# Altium footprint library S_S.PcbLib: 51 footprints (part 2 of 4)
Each footprint in its own frame and in the unit in brackets; x right, y up, seen from the top. Pads: shape width x height; smd on the part's side, far side on the other; paste and mask are expansions set on the pad; w line width, h text height; cw(c..) or ccw(c..) is an arc to the next point about the centre after c.
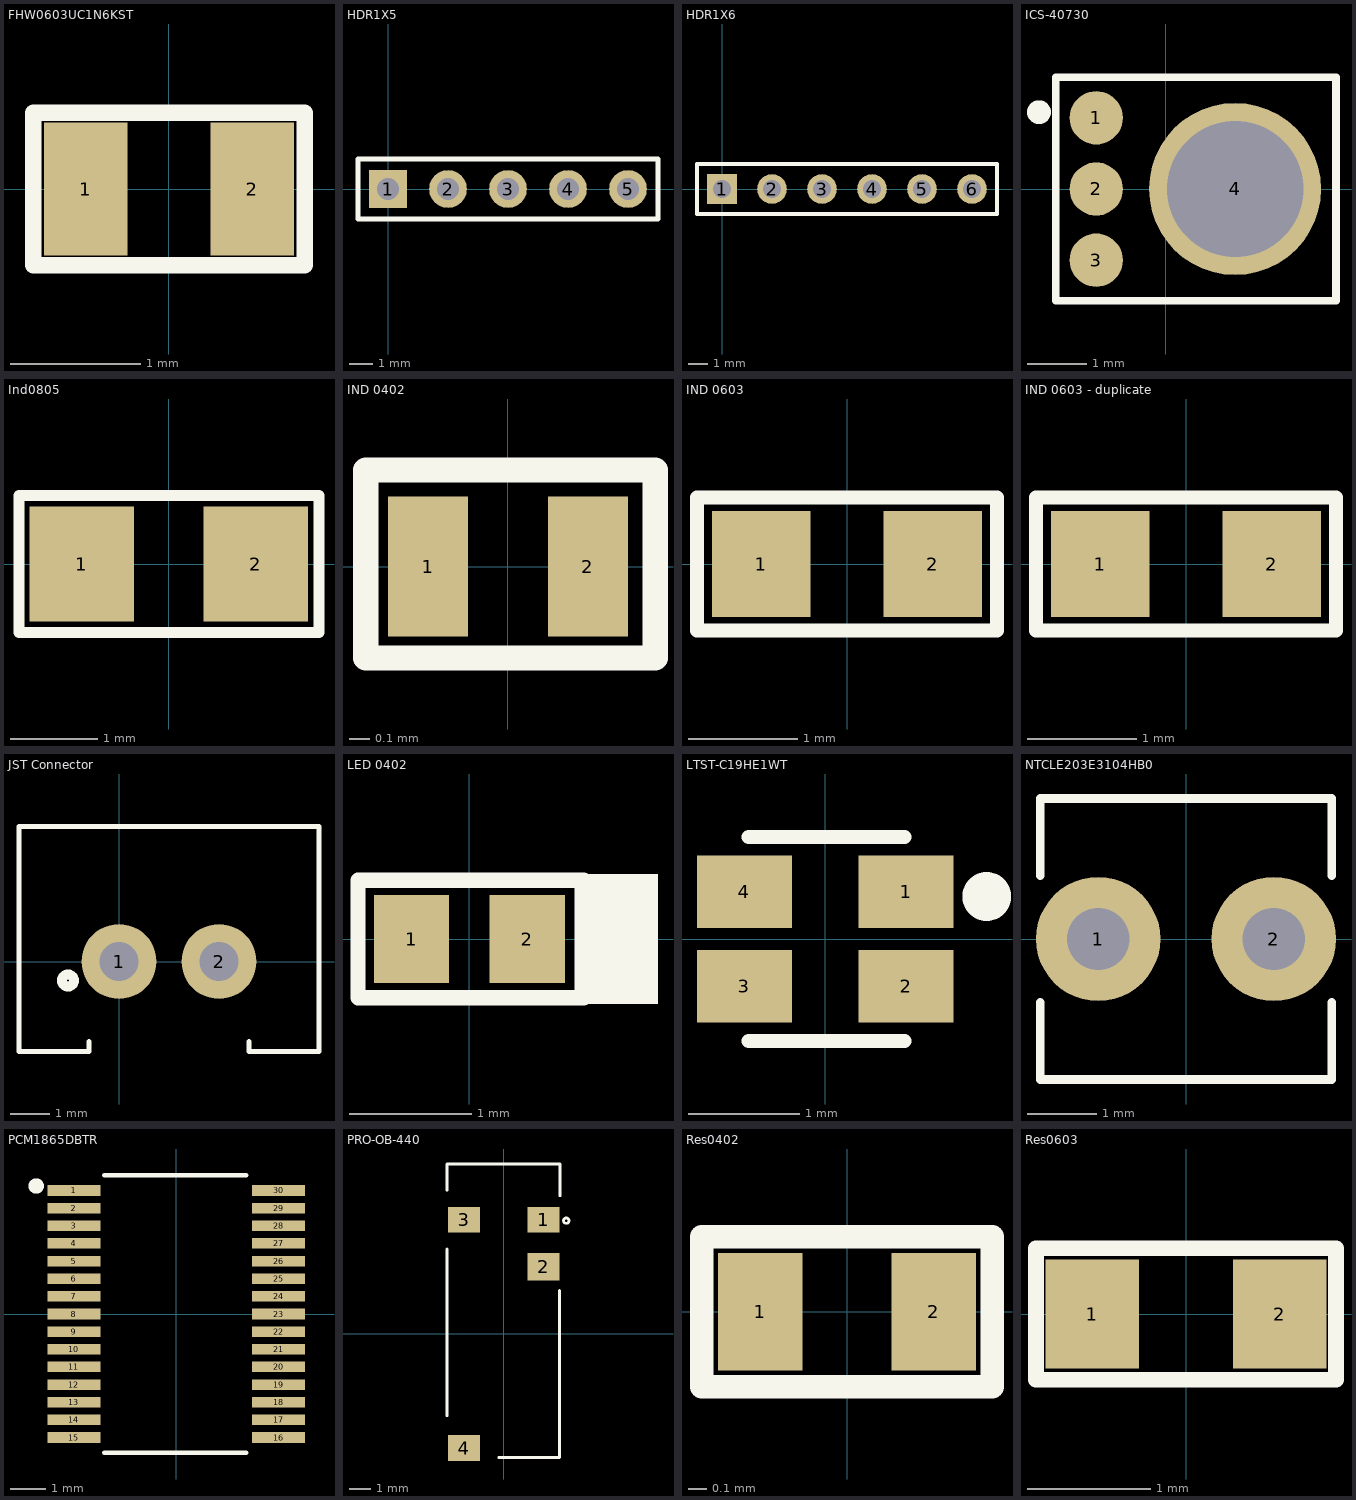
[diagram p1: the footprints below, top view; thin cyan lines are the x and y axes]

## FHW0603UC1N6KST [mm] "700mA 1.6nH ±10% 40mO 0603"
pads (2):
  rect 0.64x1.02 smd: 1(-0.64,0) 2(0.64,0)
Top Overlay:
  lines w0.127: -1.041,-0.584 -1.041,0.584 1.041,0.584 1.041,-0.584 -1.041,-0.584
3D body "Coilcraft-0603DC.STEP": height -0.37, standoff -1.23, extent -0.81,-0.365 0.81,0.365

## HDR1X5 [mm] "Connector; Header; 5 Position"
pads (5):
  rect 1.6x1.6 hole 0.95: 1(0,0)
  round 1.6 hole 0.95: 2(2.54,0) 3(5.08,0) 4(7.62,0) 5(10.16,0)
Top Overlay:
  lines w0.2: -1.27,-1.27 11.43,-1.27 11.43,1.27 -1.27,1.27 -1.27,-1.27
3D body "CircuitWorks-HEADER 2_54 VERTICAL 5X.step": height 8.65, standoff -2.35, extent -1.27,-1.27 11.43,1.23

## HDR1X6 [mm] "Connector; Header; 6 Position"
pads (6):
  rect 1.5x1.5 hole 0.9: 1(0,0)
  round 1.5 hole 0.9: 2(2.54,0) 3(5.08,0) 4(7.62,0) 5(10.16,0) 6(12.7,0)
Top Overlay:
  lines w0.2: -1.27,-1.27 13.97,-1.27 13.97,1.27 -1.27,1.27 -1.27,-1.27
3D body "User Library-Header_Male_6Pin.STEP": height 8.54, standoff -3, extent -1.27,-1.245 13.97,1.245

## ICS-40730 [mm]
pads (4):
  round 0.9 smd: 1(-1.17,1.2) 2(-1.17,0) 3(-1.17,-1.2)
  round 2.9 hole 2.3: 4(1.17,0)
Top Overlay:
  circle w0.3: c-2.135,1.295 r0.05
  lines w0.127: -1.85,-1.88 -1.85,1.88 2.87,1.88 2.87,-1.88 -1.85,-1.88
3D body "MK.STEP": height 3.55, standoff 0.03, extent -1.852,-1.88 2.868,1.88

## Ind0805 [mm] "Inductor 0805"
pads (2):
  rect 1.2x1.32 smd: 1(-1,0) 2(1,0)
Top Overlay:
  lines w0.127: -1.723,-0.787 -1.723,0.787 1.727,0.787 1.727,-0.787 -1.723,-0.787
3D body "45637.stp": height 0.47, standoff -0.03, extent -1,-0.625 1,0.625

## IND 0402 [mm]
pads (2):
  rect 0.4x0.7 smd: 1(-0.4,0) 2(0.4,0)
Top Overlay:
  lines w0.127: -0.711,-0.457 0.737,-0.457 0.737,0.483 -0.711,0.483 -0.711,-0.457
3D body "User Library-Chip Inductor.step": height 0.49, standoff -0.01, extent -0.5,-0.295 0.5,0.305

## IND 0603 [mm]
pads (2):
  rect 0.9x0.97 smd: 1(-0.785,0) 2(0.785,0)
Top Overlay:
  lines w0.127: -1.372,-0.61 1.372,-0.61 1.372,0.61 -1.372,0.61 -1.372,-0.61
3D body "45630.stp": height 0.76, standoff -0.04, extent -0.8,-0.4 0.8,0.4

## IND 0603 - duplicate [mm]
pads (2):
  rect 0.9x0.97 smd: 1(-0.785,0) 2(0.785,0)
Top Overlay:
  lines w0.127: -1.372,-0.61 1.372,-0.61 1.372,0.61 -1.372,0.61 -1.372,-0.61
3D body "45630.stp": height 0.76, standoff -0.04, extent -0.8,-0.4 0.8,0.4

## JST Connector [mil] "2 Pin JST Connector"
pads (2):
  round 75 hole 39: 1(0,0) 2(100,0)
Top Overlay:
  circle w10: c-51,-19 r6
  lines w5: -30,-80 -30,-90 -100,-90 -100,135 200,135 200,-90 130,-90 130,-80
3D body "User Library-PW10-XX-M blue.step": height 283.59, standoff -121.92, extent -97.64,-89.41 197.64,135

## LED 0402 [mm]
pads (2):
  rect 0.62x0.72 smd: 1(-0.475,0) 2(0.475,0)
Top Overlay:
  rectangle: 0.864,-0.533 1.549,0.533
  lines w0.127: 0.94,-0.483 -0.914,-0.483 -0.914,0.483 0.94,0.483
3D body "User Library-LED-0402.step": height 0.45, standoff 0, extent -0.505,-0.25 0.505,0.25

## LTST-C19HE1WT [mm]
pads (4):
  rect 0.85x0.65 smd: 1(0.725,0.425) 2(0.725,-0.425) 3(-0.725,-0.425) 4(-0.725,0.425)
Top Overlay:
  circle w0.254: c1.448,0.381 r0.092
  lines w0.127: -0.686,-0.914 0.711,-0.914 ; -0.686,0.914 0.711,0.914
3D body "LTST-C19HE1WT--3DModel-STEP-56544.STEP": height 0.35, standoff 0, extent -0.8,-0.8 0.8,0.8

## NTCLE203E3104HB0 [mm]
pads (2):
  round 1.8 hole 0.9: 1(-1.27,0) 2(1.27,0)
Top Overlay:
  lines w0.127: -2.108,-0.914 -2.108,-2.032 2.108,-2.032 2.108,-0.914 ; -2.108,0.914 -2.108,2.032 2.108,2.032 2.108,0.914
3D body "NTCLE203E3202SB0.STEP": height 8.5, standoff -38.5, extent -2.099,-2 2.082,2

## PCM1865DBTR [mm]
pads (30):
  rect 1.5x0.3 smd: 1(-2.9,3.5) 2(-2.9,3) 3(-2.9,2.5) 4(-2.9,2) 5(-2.9,1.5) 6(-2.9,1) 7(-2.9,0.5) 8(-2.9,0) 9(-2.9,-0.5) 10(-2.9,-1) 11(-2.9,-1.5) 12(-2.9,-2) 13(-2.9,-2.5) 14(-2.9,-3) 15(-2.9,-3.5) 16(2.9,-3.5) 17(2.9,-3) 18(2.9,-2.5) 19(2.9,-2) 20(2.9,-1.5) 21(2.9,-1) 22(2.9,-0.5) 23(2.9,0) 24(2.9,0.5) 25(2.9,1) 26(2.9,1.5) 27(2.9,2) 28(2.9,2.5) 29(2.9,3) 30(2.9,3.5)
Top Overlay:
  circle w0.254: c-3.967,3.627 r0.092
  lines w0.127: -2.032,-3.937 1.981,-3.937 ; -2.032,3.937 1.981,3.937
3D body "DBT0030A.stp": height 1.13, standoff 0, extent -3.2,-3.9 3.2,3.9

## PRO-OB-440 [mm] "RF ANT 2.4GHZ STAMPED MET SLD"
pads (4):
  rect 1.5x1.2 smd: 1(1.865,5.35) 3(-1.865,5.35) 4(-1.865,-5.35)
  rect 1.5x1.28 smd: 2(1.865,3.15)
Top Overlay:
  circle w0.127: c2.921,5.309 r0.127
  lines w0.127: -2.667,-3.835 -2.667,3.975 ; -2.667,6.731 -2.667,7.963 2.629,7.963 2.629,6.477 ; -0.241,-5.791 2.603,-5.791 2.603,2.032
3D body "PRO-OB-440--3DModel-STEP-1.STEP": height 3.5, standoff -0.03, extent -2.615,-5.744 2.615,8.005

## Res0402 [mil]
pads (2):
  rect 18x25 smd mask+4: 1(-18.5,0) 2(18.5,0)
Top Overlay:
  lines w0.13: -32,-17 32,-17
  lines w5: -31,-16 -31,16 31,16 31,-16 -31,-16
3D body "User Library-RES_1005-0402.step": height 16.14, standoff 0, extent -22.63,-10.82 22.64,10.83

## Res0603 [mil]
pads (2):
  rect 30x35 smd: 1(-30,0) 2(30,0)
Top Overlay:
  lines w5: -48,-21 -48,21 48,21 48,-21 -48,-21
3D body "User Library-RESC1608X05N.step": height 17.76, standoff 0, extent -30.52,-16.74 30.51,16.73